# Altium footprint library S_D.PcbLib: 40 footprints (part 1 of 3)
Each footprint in its own frame and in the unit in brackets; x right, y up, seen from the top. Pads: shape width x height; smd on the part's side, far side on the other; paste and mask are expansions set on the pad; w line width, h text height; cw(c..) or ccw(c..) is an arc to the next point about the centre after c.
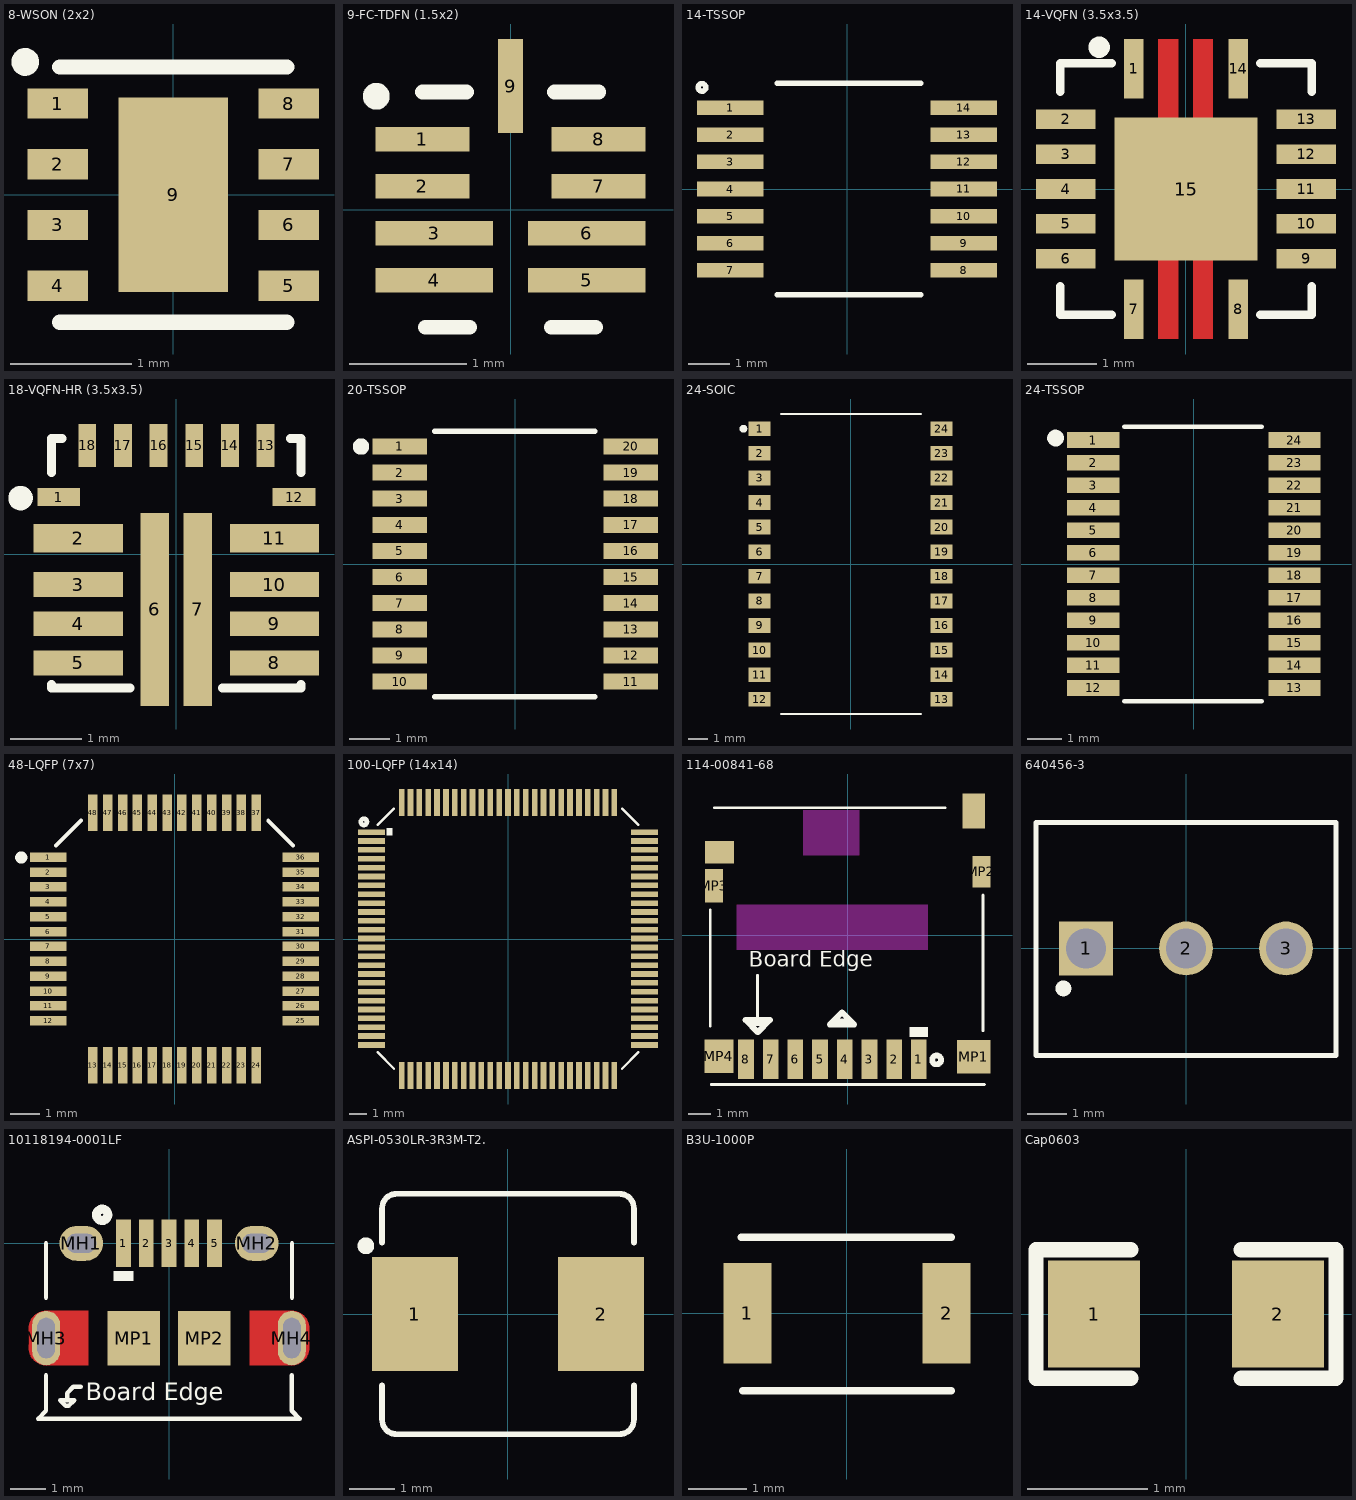
[diagram p0: the footprints below, top view; thin cyan lines are the x and y axes]

## 8-WSON (2x2) [mm] "Power Switch/Driver 1:1 N-Channel 4A 8-WSON (2x2)"
pads (9):
  rect 0.5x0.25 smd: 1(-0.95,0.75) 2(-0.95,0.25) 3(-0.95,-0.25) 4(-0.95,-0.75) 5(0.95,-0.75) 6(0.95,-0.25) 7(0.95,0.25) 8(0.95,0.75)
  rect 0.9x1.6 smd: 9(0,0)
Top Overlay:
  circle w0.127: c-1.219,1.092 r0.051
  lines w0.127: -0.933,-1.051 0.936,-1.051 ; -0.934,1.051 0.937,1.051
3D body "TPS22965TDSGRQ1.STEP": height 0.8, standoff 0, extent -1,-1 1,1

## 9-FC-TDFN (1.5x2) [mm]
pads (9):
  rect 0.8x0.21 smd: 1(-0.75,0.6) 2(-0.75,0.2) 7(0.75,0.2) 8(0.75,0.6)
  rect 1x0.21 smd: 3(-0.648,-0.2) 4(-0.648,-0.6) 5(0.648,-0.6) 6(0.648,-0.2)
  rect 0.21x0.8 smd: 9(0,1.052)
Top Overlay:
  circle w0.127: c-1.143,0.965 r0.051
  lines w0.127: -0.75,1 -0.375,1 ; -0.725,-1 -0.35,-1 ; 0.35,-1 0.725,-1 ; 0.375,1 0.75,1

## 14-TSSOP [mm]
pads (14):
  rect 1.6x0.35 smd: 1(-2.8,1.95) 2(-2.8,1.3) 3(-2.8,0.65) 4(-2.8,0) 5(-2.8,-0.65) 6(-2.8,-1.3) 7(-2.8,-1.95) 8(2.8,-1.95) 9(2.8,-1.3) 10(2.8,-0.65) 11(2.8,0) 12(2.8,0.65) 13(2.8,1.3) 14(2.8,1.95)
Top Overlay:
  circle w0.127: c-3.48,2.438 r0.092
  lines w0.127: -1.676,-2.54 1.778,-2.54 ; -1.676,2.54 1.778,2.54
3D body "SN74LV07APWR.STEP": height 1.2, standoff 0, extent -3.174,-2.5 3.226,2.5

## 14-VQFN (3.5x3.5) [mm]
pads (15):
  rect 0.28x0.85 smd: 1(-0.75,1.725) 7(-0.75,-1.725) 8(0.75,-1.725) 14(0.75,1.725)
  rect 0.85x0.28 smd: 2(-1.725,1) 3(-1.725,0.5) 4(-1.725,0) 5(-1.725,-0.5) 6(-1.725,-1) 9(1.725,-1) 10(1.725,-0.5) 11(1.725,0) 12(1.725,0.5) 13(1.725,1)
  rect 2.05x2.05 smd: 15(0,0)
Top Layer:
  region: 0.097,-0.949 0.097,-2.149 0.39,-2.149 0.39,-0.949
  region: -0.403,-0.949 -0.403,-2.149 -0.11,-2.149 -0.11,-0.949
  region: 0.39,0.949 0.39,2.149 0.097,2.149 0.097,0.949
  region: -0.11,0.949 -0.11,2.149 -0.403,2.149 -0.403,0.949
Top Overlay:
  circle w0.254: c-1.245,2.032 r0.025
  lines w0.127: -1.803,-1.397 -1.803,-1.803 -1.067,-1.803 ; -1.803,1.397 -1.803,1.803 -1.067,1.803 ; 1.067,-1.803 1.803,-1.803 1.803,-1.397 ; 1.067,1.803 1.803,1.803 1.803,1.397
3D body "RHL0014A.stp": height 1, standoff 0, extent -1.75,-1.75 1.75,1.75

## 18-VQFN-HR (3.5x3.5) [mm]
pads (18):
  rect 0.6x0.25 smd mask+0: 1(-1.65,0.8) 12(1.65,0.8)
  rect 1.25x0.4 smd paste-2 mask+0: 2(-1.375,0.225) 11(1.375,0.225)
  rect 1.25x0.35 smd paste-2 mask+0: 3(-1.375,-0.425) 4(-1.375,-0.975) 5(-1.375,-1.525) 8(1.375,-1.525) 9(1.375,-0.975) 10(1.375,-0.425)
  rect 0.4x2.7 smd paste-2 mask+0: 6(-0.3,-0.775) 7(0.3,-0.775)
  rect 0.25x0.6 smd mask+0: 13(1.25,1.525) 14(0.75,1.525) 15(0.25,1.525) 16(-0.25,1.525) 17(-0.75,1.525) 18(-1.25,1.525)
Top Overlay:
  circle w0.3: c-2.184,0.787 r0.021
  lines w0.127: -1.75,-1.825 -1.75,-1.875 -0.65,-1.875 ; -1.75,1.145 -1.75,1.625 -1.6,1.625 ; 0.65,-1.875 1.75,-1.875 1.75,-1.825 ; 1.6,1.625 1.75,1.625 1.75,1.145
Top Paste:
  region: 0.45,-2.079 0.15,-2.079 0.15,-1.343 0.45,-1.343
  region: -0.15,-2.079 -0.451,-2.079 -0.451,-1.343 -0.15,-1.343
  region: 0.45,-1.145 0.15,-1.145 0.15,-0.409 0.45,-0.409
  region: -0.15,-1.144 -0.451,-1.144 -0.451,-0.409 -0.15,-0.409
  region: 0.45,-0.209 0.15,-0.209 0.15,0.524 0.45,0.524
  region: -0.15,-0.209 -0.45,-0.209 -0.45,0.524 -0.15,0.524
  region: 1.95,-1.651 0.801,-1.651 0.801,-1.4 1.95,-1.4
  region: 1.95,-1.101 0.801,-1.101 0.801,-0.85 1.95,-0.85
  region: 1.95,-0.551 0.801,-0.551 0.801,-0.3 1.95,-0.3
  region: -0.8,-1.653 -1.953,-1.653 -1.953,-1.4 -0.8,-1.4
  region: -0.8,-1.1 -1.95,-1.1 -1.95,-0.85 -0.8,-0.85
  region: -0.8,-0.55 -1.95,-0.55 -1.95,-0.3 -0.8,-0.3
  region: 1.95,0.045 0.8,0.045 0.8,0.405 1.95,0.405
  region: -0.8,0.045 -1.95,0.045 -1.95,0.405 -0.8,0.405
Top Solder:
  region: 0.45,-2.079 0.15,-2.079 0.15,0.525 0.45,0.525
  region: -0.15,-2.078 -0.451,-2.078 -0.451,0.525 -0.15,0.525
  region: 2,0.626 1.302,0.626 1.302,0.975 2,0.975
  region: -1.3,0.625 -2,0.625 -2,0.975 -1.3,0.975
  region: 1.425,1.175 1.075,1.175 1.075,1.875 1.425,1.875
  region: 0.425,1.177 0.075,1.177 0.075,1.875 0.425,1.875
  region: -0.075,1.177 -0.426,1.177 -0.426,1.875 -0.075,1.875
  region: 0.925,1.176 0.576,1.176 0.576,1.875 0.925,1.875
  region: -0.575,1.175 -0.925,1.175 -0.925,1.875 -0.575,1.875
  region: -1.075,1.177 -1.427,1.177 -1.427,1.875 -1.075,1.875
  region: 1.95,-1.651 0.801,-1.651 0.801,-1.4 1.95,-1.4
  region: 1.95,-1.102 0.802,-1.102 0.802,-0.85 1.95,-0.85
  region: 1.95,-0.551 0.801,-0.551 0.801,-0.3 1.95,-0.3
  region: -0.8,-1.65 -1.95,-1.65 -1.95,-1.4 -0.8,-1.4
  region: -0.8,-1.101 -1.952,-1.101 -1.952,-0.85 -0.8,-0.85
  region: -0.8,-0.551 -1.953,-0.551 -1.953,-0.3 -0.8,-0.3
  region: 1.95,0.025 0.801,0.025 0.801,0.425 1.95,0.425
  region: -0.8,0.025 -1.954,0.025 -1.954,0.425 -0.8,0.425
3D body "TPS56C215RNNR.STEP": height 0.9, standoff -0.03, extent -1.751,-1.851 1.751,1.651

## 20-TSSOP [mm]
pads (20):
  rect 1.35x0.4 smd: 1(-2.875,2.925) 2(-2.875,2.275) 3(-2.875,1.625) 4(-2.875,0.975) 5(-2.875,0.325) 6(-2.875,-0.325) 7(-2.875,-0.975) 8(-2.875,-1.625) 9(-2.875,-2.275) 10(-2.875,-2.925) 11(2.875,-2.925) 12(2.875,-2.275) 13(2.875,-1.625) 14(2.875,-0.975) 15(2.875,-0.325) 16(2.875,0.325) 17(2.875,0.975) 18(2.875,1.625) 19(2.875,2.275) 20(2.875,2.925)
Top Overlay:
  circle w0.254: c-3.835,2.921 r0.076
  lines w0.127: -2.007,-3.302 1.981,-3.302 ; -2.007,3.302 1.981,3.302
3D body "STM32F030F4P6--3DModel-STEP-56544.STEP": height 1.15, standoff -0.05, extent -3.2,-3.25 3.2,3.25

## 24-SOIC [mil] "IC TRANSLATION TXRX 5.5V 24SOIC"
pads (24):
  rect 45x30 smd: 1(-184.94,275) 2(-184.94,225) 3(-184.94,175) 4(-184.94,125) 5(-184.94,75) 6(-184.94,25) 7(-184.94,-25) 8(-184.94,-75) 9(-184.94,-125) 10(-184.94,-175) 11(-184.94,-225) 12(-184.94,-275) 13(184.94,-275) 14(184.94,-225) 15(184.94,-175) 16(184.94,-125) 17(184.94,-75) 18(184.94,-25) 19(184.94,25) 20(184.94,75) 21(184.94,125) 22(184.94,175) 23(184.94,225) 24(184.94,275)
Top Overlay:
  circle w7.87: c-218,275 r4
  lines w5: -141,-305 143,-305 ; -141,305 143,305
3D body "SN74LVC8T245DWR.STEP": height 104.33, standoff 0, extent -202.75,-303.14 202.76,303.16

## 24-TSSOP [mm]
pads (24):
  rect 1.5x0.45 smd: 1(-2.9,3.575) 2(-2.9,2.925) 3(-2.9,2.275) 4(-2.9,1.625) 5(-2.9,0.975) 6(-2.9,0.325) 7(-2.9,-0.325) 8(-2.9,-0.975) 9(-2.9,-1.625) 10(-2.9,-2.275) 11(-2.9,-2.925) 12(-2.9,-3.575) 13(2.9,-3.575) 14(2.9,-2.925) 15(2.9,-2.275) 16(2.9,-1.625) 17(2.9,-0.975) 18(2.9,-0.325) 19(2.9,0.325) 20(2.9,0.975) 21(2.9,1.625) 22(2.9,2.275) 23(2.9,2.925) 24(2.9,3.575)
Top Overlay:
  circle w0.254: c-3.988,3.632 r0.114
  lines w0.127: -2.007,-3.962 1.956,-3.962 ; -2.007,3.962 1.956,3.962
3D body "SN74LVC8T245MPWREP.STEP": height 1.2, standoff 0, extent -3.2,-3.9 3.2,3.9

## 48-LQFP (7x7) [mm]
pads (48):
  rect 1.22x0.32 smd: 1(-4.25,2.75) 2(-4.25,2.25) 3(-4.25,1.75) 4(-4.25,1.25) 5(-4.25,0.75) 6(-4.25,0.25) 7(-4.25,-0.25) 8(-4.25,-0.75) 9(-4.25,-1.25) 10(-4.25,-1.75) 11(-4.25,-2.25) 12(-4.25,-2.75) 25(4.25,-2.75) 26(4.25,-2.25) 27(4.25,-1.75) 28(4.25,-1.25) 29(4.25,-0.75) 30(4.25,-0.25) 31(4.25,0.25) 32(4.25,0.75) 33(4.25,1.25) 34(4.25,1.75) 35(4.25,2.25) 36(4.25,2.75)
  rect 0.32x1.22 smd: 13(-2.75,-4.25) 14(-2.25,-4.25) 15(-1.75,-4.25) 16(-1.25,-4.25) 17(-0.75,-4.25) 18(-0.25,-4.25) 19(0.25,-4.25) 20(0.75,-4.25) 21(1.25,-4.25) 22(1.75,-4.25) 23(2.25,-4.25) 24(2.75,-4.25) 37(2.75,4.25) 38(2.25,4.25) 39(1.75,4.25) 40(1.25,4.25) 41(0.75,4.25) 42(0.25,4.25) 43(-0.25,4.25) 44(-0.75,4.25) 45(-1.25,4.25) 46(-1.75,4.25) 47(-2.25,4.25) 48(-2.75,4.25)
Top Overlay:
  circle w0.254: c-5.156,2.743 r0.076
  lines w0.127: -3.988,3.15 -3.15,3.988 ; 3.15,3.988 3.988,3.15
3D body "User Library-P-LQFP48-7x7-0_50.step": height 1.43, standoff -0.02, extent -4.513,-4.512 4.487,4.488

## 100-LQFP (14x14) [mm]
pads (100):
  rect 1.52x0.32 smd: 1(-7.7,6.025) 2(-7.7,5.525) 3(-7.7,5.025) 4(-7.7,4.525) 5(-7.7,4.025) 6(-7.7,3.525) 7(-7.7,3.025) 8(-7.7,2.525) 9(-7.7,2.025) 10(-7.7,1.525) 11(-7.7,1.025) 12(-7.7,0.525) 13(-7.7,0.025) 14(-7.7,-0.475) 15(-7.7,-0.975) 16(-7.7,-1.475) 17(-7.7,-1.975) 18(-7.7,-2.475) 19(-7.7,-2.975) 20(-7.7,-3.475) 21(-7.7,-3.975) 22(-7.7,-4.475) 23(-7.7,-4.975) 24(-7.7,-5.475) 25(-7.7,-5.975) 51(7.7,-5.975) 52(7.7,-5.475) 53(7.7,-4.975) 54(7.7,-4.475) 55(7.7,-3.975) 56(7.7,-3.475) 57(7.7,-2.975) 58(7.7,-2.475) 59(7.7,-1.975) 60(7.7,-1.475) 61(7.7,-0.975) 62(7.7,-0.475) 63(7.7,0.025) 64(7.7,0.525) 65(7.7,1.025) 66(7.7,1.525) 67(7.7,2.025) 68(7.7,2.525) 69(7.7,3.025) 70(7.7,3.525) 71(7.7,4.025) 72(7.7,4.525) 73(7.7,5.025) 74(7.7,5.525) 75(7.7,6.025)
  rect 0.32x1.52 smd: 26(-6,-7.7) 27(-5.5,-7.7) 28(-5,-7.7) 29(-4.5,-7.7) 30(-4,-7.7) 31(-3.5,-7.7) 32(-3,-7.7) 33(-2.5,-7.7) 34(-2,-7.7) 35(-1.5,-7.7) 36(-1,-7.7) 37(-0.5,-7.7) 38(0,-7.7) 39(0.5,-7.7) 40(1,-7.7) 41(1.5,-7.7) 42(2,-7.7) 43(2.5,-7.7) 44(3,-7.7) 45(3.5,-7.7) 46(4,-7.7) 47(4.5,-7.7) 48(5,-7.7) 49(5.5,-7.7) 50(6,-7.7) 76(6,7.7) 77(5.5,7.7) 78(5,7.7) 79(4.5,7.7) 80(4,7.7) 81(3.5,7.7) 82(3,7.7) 83(2.5,7.7) 84(2,7.7) 85(1.5,7.7) 86(1,7.7) 87(0.5,7.7) 88(0,7.7) 89(-0.5,7.7) 90(-1,7.7) 91(-1.5,7.7) 92(-2,7.7) 93(-2.5,7.7) 94(-3,7.7) 95(-3.5,7.7) 96(-4,7.7) 97(-4.5,7.7) 98(-5,7.7) 99(-5.5,7.7) 100(-6,7.7)
Top Overlay:
  circle w0.254: c-8.128,6.604 r0.178
  region: -6.528,6.274 -6.858,6.274 -6.858,5.842 -6.528,5.842
  lines w0.127: -7.366,-6.375 -6.426,-7.315 ; -7.366,6.426 -6.426,7.366 ; 6.426,-7.315 7.366,-6.375 ; 6.426,7.366 7.366,6.426
3D body "User Library-LQFP100_05.step": height 1.6, standoff 0, extent -8,-7.974 8,8.026

## 114-00841-68 [mm]
pads (14):
  rect 0.7x1.75 smd: 1(3.174,-5.526) 2(2.074,-5.526) 3(0.974,-5.526) 4(-0.126,-5.526) 5(-1.226,-5.526) 6(-2.326,-5.526) 7(-3.426,-5.526) 8(-4.526,-5.526)
  rect 1x1.55 smd: "#CD Switch"(5.624,5.526)
  rect 1.3x1 smd: "*CD Switch"(-5.7,3.694)
  rect 1.5x1.5 smd: MP1(5.624,-5.424)
  rect 0.8x1.4 smd: MP2(5.954,2.826)
  rect 0.8x1.5 smd: MP3(-5.954,2.196)
  rect 1.3x1.5 smd: MP4(-5.726,-5.399)
Top Overlay:
  circle w0.254: c3.962,-5.563 r0.198
  rectangle: 2.752,-4.544 3.591,-4.087
  region: 0.025,-3.708 -0.632,-3.708 -0.632,-3.981 0.025,-3.981
  rectangle: -4.274,-4.058 -3.616,-3.785
  lines w0.127: -6.112,-4.062 -6.112,1.12 ; -6.071,-6.655 6.096,-6.655 ; -5.934,5.666 4.353,5.666 ; -4.013,-3.683 -4.013,-1.792 ; 6.029,-4.265 6.029,1.78
  lines w0.254: -4.547,-3.785 -3.454,-3.785 -4,-4.331 -4.547,-3.785 ; -0.794,-3.981 0.298,-3.981 -0.248,-3.435 -0.794,-3.981
  text "Board Edge" at -4.394,-1.406 h0.7
Keep-Out Layer:
  region: 3.574,-0.649 -4.926,-0.649 -4.926,1.351 3.574,1.351
  region: 0.524,3.551 -1.976,3.551 -1.976,5.551 0.524,5.551
  region: 0.524,3.551 -1.976,3.551 -1.976,5.551 0.524,5.551
  region: 3.574,-0.649 -4.926,-0.649 -4.926,1.351 3.574,1.351
3D body "1140084168--3DModel-STEP-56544.STEP": height 1.47, standoff -0.03, extent -6.05,-5.916 5.97,5.584

## 640456-3 [mm]
pads (3):
  rect 1.37x1.37 hole 1.02: 1(-2.54,0)
  round 1.37 hole 1.02: 2(0,0) 3(2.54,0)
Top Overlay:
  circle w0.2: c-3.114,-1.016 r0.1
  lines w0.127: -3.81,-2.723 -3.81,3.2 3.81,3.2 3.81,-2.723 -3.81,-2.723
3D body "640456-3.stp": height 10.49, standoff -3.1, extent -3.81,-2.667 3.81,3.175

## 10118194-0001LF [mm]
pads (11):
  rect 0.42x1.35 smd: 1(-1.3,0) 2(-0.65,0) 3(0,0) 4(0.65,0) 5(1.3,0)
  oval 1.25x1 hole 0.55 slot 0.85 at 0 deg: MH1(-2.5,0) MH2(2.5,0)
  oval 0.8x1.55 hole 0.5 slot 1.15 at 90 deg: MH3(-3.5,-2.7) MH4(3.5,-2.7)
  rect 1.5x1.55 smd: MP1(-1,-2.7) MP2(1,-2.7)
Top Layer:
  region: 192 vertices and 0 holes, not listed, extent -4,-3.475 -2.3,-1.92
  region: 192 vertices and 0 holes, not listed, extent 2.3,-3.48 4,-1.925
Top Overlay:
  circle w0.254: c-1.905,0.813 r0.163
  rectangle: -1.575,-1.067 -1.016,-0.787
  lines w0.127: -3.505,-3.765 -3.505,-4.765 -3.505,-4.775 -3.734,-5.004 3.723,-5.004 3.495,-4.775 ; -3.505,-1.549 -3.505,0 ; -2.521,-4.09 -2.725,-4.09 -2.902,-4.268 -2.902,-4.471 ; 3.495,-4.765 3.495,-3.765 ; 3.505,-1.549 3.505,0 ; -2.902,-4.471 -3.106,-4.471 -2.942,-4.635 -2.862,-4.635 -2.699,-4.471 -2.902,-4.471
  text "Board Edge" at -2.373,-4.471 h0.5
3D body "10118194-0001LF--3DModel-STEP-56544.STEP": height 2.69, standoff -0.58, extent -4.017,-5.338 4.033,0.192
3D body: height 0.25, standoff 0, extent -7.671,-3.81 -7.671,-3.81

## ASPI-0530LR-3R3M-T2. [mm]
pads (2):
  rect 1.895x2.5 smd: 1(-2.047,0) 2(2.048,0)
Top Overlay:
  circle w0.254: c-3.124,1.499 r0.057
  lines w0.127: -2.769,-1.575 -2.769,-2.311 ccw(c-2.451,-2.324) -2.438,-2.642 2.438,-2.642 ccw(c2.451,-2.324) 2.769,-2.311 2.769,-1.575 ; -2.769,1.575 -2.769,2.311 cw(c-2.451,2.324) -2.438,2.642 2.438,2.642 cw(c2.451,2.324) 2.769,2.311 2.769,1.575
3D body "ASPI-0530LR.STEP": height 3, standoff 0, extent -2.8,-2.6 2.8,2.6

## B3U-1000P [mm] "SWITCH TACTILE SPST-NO 0.05A 12V"
pads (2):
  rect 0.82x1.72 smd: 1(-1.7,0) 2(1.7,0)
Top Overlay:
  lines w0.127: -1.803,1.295 0,1.295 1.778,1.295 ; -1.778,-1.321 0,-1.321 1.778,-1.321
3D body "User Library-OMRON B3U1000P.step": height 1.6, standoff 0, extent -2,-1.263 2,1.237

## Cap0603 [mil]
pads (2):
  rect 30x35 smd mask+2.36: 1(-30,0) 2(30,0)
Top Overlay:
  lines w5: -18,-21 -49,-21 -49,21 -18,21 ; 18,-21 49,-21 49,21 18,21
3D body "User Library-CAPC1608X09.step": height 34.25, standoff -1.18, extent -31.51,-15.75 31.49,15.74